# Altium footprint library FootPrintLib_8.PcbLib: 590 footprints (part 36 of 37)
Each footprint in its own frame and in the unit in brackets; x right, y up, seen from the top. Pads: shape width x height; smd on the part's side, far side on the other; paste and mask are expansions set on the pad; w line width, h text height; cw(c..) or ccw(c..) is an arc to the next point about the centre after c.
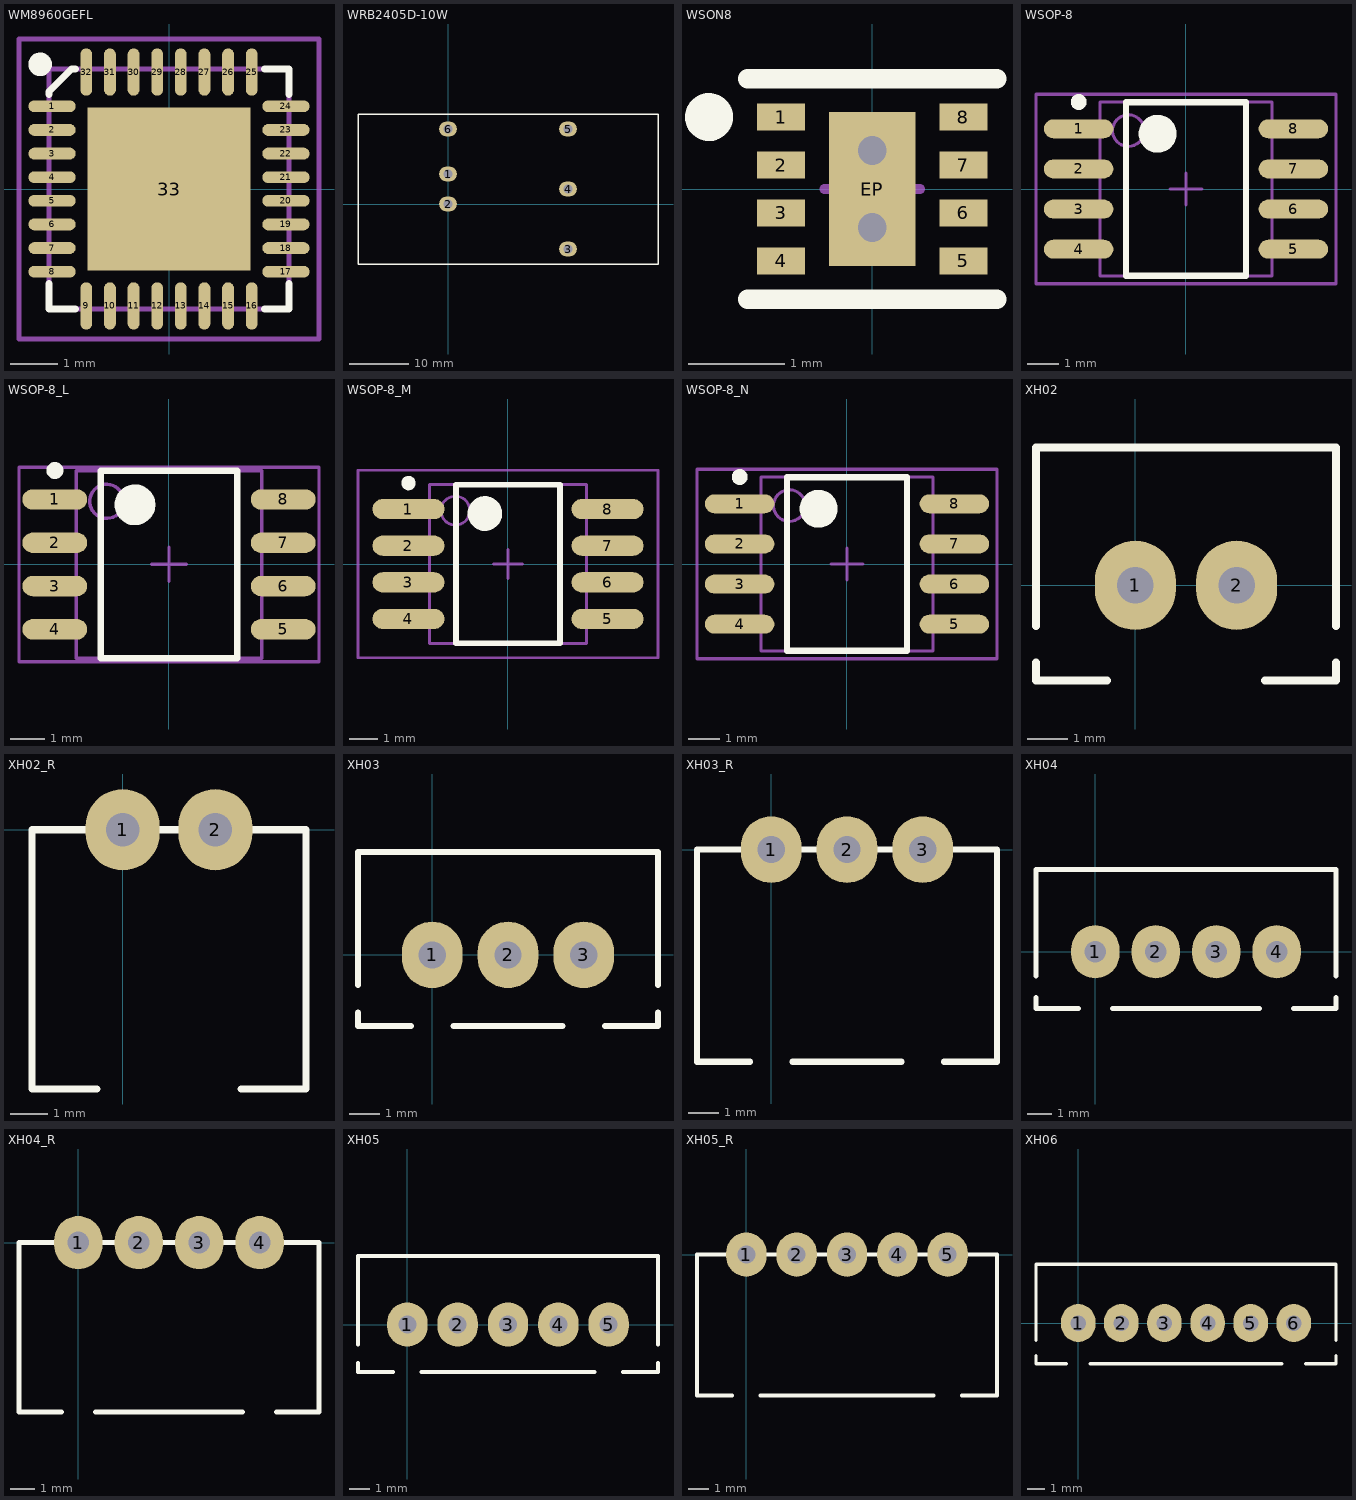
[diagram p35: the footprints below, top view; thin cyan lines are the x and y axes]

## WM8960GEFL [mm] "WM8960GEFL 32 PIN QFN PLASTIC PACKAGE 5 X 5 X 0.9 mm BODY, 0.50 mm LEAD PITCH"
height 0.9
pads (33):
  oval 1x0.25 smd: 1(-2.475,1.75) 2(-2.475,1.25) 3(-2.475,0.75) 4(-2.475,0.25) 5(-2.475,-0.25) 6(-2.475,-0.75) 7(-2.475,-1.25) 8(-2.475,-1.75) 17(2.475,-1.75) 18(2.475,-1.25) 19(2.475,-0.75) 20(2.475,-0.25) 21(2.475,0.25) 22(2.475,0.75) 23(2.475,1.25) 24(2.475,1.75)
  oval 0.25x1 smd: 9(-1.75,-2.475) 10(-1.25,-2.475) 11(-0.75,-2.475) 12(-0.25,-2.475) 13(0.25,-2.475) 14(0.75,-2.475) 15(1.25,-2.475) 16(1.75,-2.475) 25(1.75,2.475) 26(1.25,2.475) 27(0.75,2.475) 28(0.25,2.475) 29(-0.25,2.475) 30(-0.75,2.475) 31(-1.25,2.475) 32(-1.75,2.475)
  rect 3.45x3.45 smd paste-1.73: 33(0,0)
Top Overlay:
  circle w0.25: c-2.727,2.639 r0.125
  lines w0.15: -2.54,-2 -2.54,-2.54 -1.975,-2.54 ; -2.54,2 -2.54,2.066 -2.066,2.54 -1.975,2.54 ; 2.025,-2.54 2.54,-2.54 2.54,-2 ; 2.025,2.54 2.54,2.54 2.54,2
Top Paste:
  drawing of 25 lines, arcs and shapes, not listed
Mechanical 13:
  lines w0.1: -2.54,-2.54 2.54,-2.54 2.54,2.54 -2.54,2.54 -2.54,-2.54
Mechanical 15:
  lines w0.1: -0.5,0 0.5,0 ; 0,-0.5 0,0.5 ; -3.175,-3.175 -3.175,3.175 3.175,3.175 3.175,-3.175 -3.175,-3.175
3D body "User Library-QFN-32-5x5mm-WithPad.step": height 0.8, standoff 0, extent -2.515,-2.515 2.505,2.505

## WRB2405D-10W [mm] "Mornsun DC/DC Converter"
pads (6):
  oval 3x2.5 hole 1.5: 1(0,5.08) 2(0,0) 3(20.32,-7.62) 4(20.32,2.54) 5(20.32,12.7) 6(0,12.7)
Top Overlay:
  lines w0.254: -15.24,-10.16 -15.24,15.24 35.56,15.24 35.56,-10.16 -15.24,-10.16

## WSON8 [mm]
pads (9):
  rect 0.5x0.28 smd: 1(-0.95,0.75) 2(-0.95,0.25) 3(-0.95,-0.25) 4(-0.95,-0.75) 5(0.95,-0.75) 6(0.95,-0.25) 7(0.95,0.25) 8(0.95,0.75)
  rect 0.9x1.6 smd: EP(0,0)
via 0,0.4 diameter 0.5 hole 0.3
via 0,-0.4 diameter 0.5 hole 0.3
Top Overlay:
  circle w0.25: c-1.702,0.75 r0.125
  lines w0.2: -1.3,-1.15 1.3,-1.15 ; -1.3,1.15 1.3,1.15
Mechanical 15:
  lines w0.1: -0.5,0 0.5,0 ; 0,-0.5 0,0.5
3D body: height 0.65, standoff 0, extent -0.8,-0.8 0.8,0.8

## WSOP-8 [mm] "8-Pin Small Outline Package 1.27 mm Pitch, IPC Medium Density"
height 2.03
pads (8):
  oval 2.2x0.6 smd: 1(-3.4,1.905) 2(-3.4,0.635) 3(-3.4,-0.635) 4(-3.4,-1.905) 5(3.4,-1.905) 6(3.4,-0.635) 7(3.4,0.635) 8(3.4,1.905)
Top Overlay:
  circle w0.25: c-3.4,2.755 r0.125
  circle w0.6: c-0.9,1.75 r0.3
  lines w0.2: -1.9,-2.75 -1.9,2.75 1.9,2.75 1.9,-2.75 -1.9,-2.75
Mechanical 13:
  circle w0.1: c-1.825,1.85 r0.5
  lines w0.1: -2.725,-2.75 -2.725,2.75 2.725,2.75 2.725,-2.75 -2.725,-2.75
Mechanical 15:
  lines w0.1: -0.5,0 0.5,0 ; 0,-0.5 0,0.5 ; -4.75,-3 -4.75,3 4.75,3 4.75,-3 -4.75,-3
3D body "User Library-SO8-Wide-5mmx5mm.step": height 1.75, standoff -0.01, extent -4.051,-2.73 4.05,2.73

## WSOP-8_L [mm] "8-Pin Small Outline Package 1.27 mm Pitch, IPC High Density"
height 2.03
pads (8):
  oval 1.9x0.6 smd: 1(-3.35,1.905) 2(-3.35,0.635) 3(-3.35,-0.635) 4(-3.35,-1.905) 5(3.35,-1.905) 6(3.35,-0.635) 7(3.35,0.635) 8(3.35,1.905)
Top Overlay:
  circle w0.6: c-1,1.75 r0.3
  circle w0.25: c-3.35,2.755 r0.125
  lines w0.2: -2,-2.75 2,-2.75 2,2.75 -2,2.75 -2,-2.75
Mechanical 13:
  circle w0.1: c-1.825,1.85 r0.5
  lines w0.1: -2.725,-2.75 2.725,-2.75 2.725,2.75 -2.725,2.75 -2.725,-2.75
Mechanical 15:
  lines w0.1: -0.5,0 0.5,0 ; 0,-0.5 0,0.5 ; -4.4,-2.85 4.4,-2.85 4.4,2.85 -4.4,2.85 -4.4,-2.85
3D body "User Library-SO8-Wide-5mmx5mm.step": height 1.75, standoff -0.01, extent -4.051,-2.73 4.05,2.73

## WSOP-8_M [mm] "8-Pin Small Outline Package 1.27 mm Pitch, IPC Low Density"
height 2.03
pads (8):
  oval 2.5x0.7 smd: 1(-3.45,1.905) 2(-3.45,0.635) 3(-3.45,-0.635) 4(-3.45,-1.905) 5(3.45,-1.905) 6(3.45,-0.635) 7(3.45,0.635) 8(3.45,1.905)
Top Overlay:
  circle w0.25: c-3.45,2.805 r0.125
  circle w0.6: c-0.8,1.75 r0.3
  lines w0.2: -1.8,-2.75 -1.8,2.75 1.8,2.75 1.8,-2.75 -1.8,-2.75
Mechanical 13:
  circle w0.1: c-1.825,1.85 r0.5
  lines w0.1: -2.725,-2.75 -2.725,2.75 2.725,2.75 2.725,-2.75 -2.725,-2.75
Mechanical 15:
  lines w0.1: -0.5,0 0.5,0 ; 0,-0.5 0,0.5 ; -5.2,-3.25 -5.2,3.25 5.2,3.25 5.2,-3.25 -5.2,-3.25
3D body "User Library-SO8-Wide-5mmx5mm.step": height 1.75, standoff -0.01, extent -4.051,-2.73 4.05,2.73

## WSOP-8_N [mm] "8-Pin Small Outline Package 1.27 mm Pitch, IPC Medium Density"
height 2.03
pads (8):
  oval 2.2x0.6 smd: 1(-3.4,1.905) 2(-3.4,0.635) 3(-3.4,-0.635) 4(-3.4,-1.905) 5(3.4,-1.905) 6(3.4,-0.635) 7(3.4,0.635) 8(3.4,1.905)
Top Overlay:
  circle w0.6: c-0.9,1.75 r0.3
  circle w0.25: c-3.4,2.755 r0.125
  lines w0.2: -1.9,-2.75 1.9,-2.75 1.9,2.75 -1.9,2.75 -1.9,-2.75
Mechanical 13:
  circle w0.1: c-1.825,1.85 r0.5
  lines w0.1: -2.725,-2.75 2.725,-2.75 2.725,2.75 -2.725,2.75 -2.725,-2.75
Mechanical 15:
  lines w0.1: -0.5,0 0.5,0 ; 0,-0.5 0,0.5 ; -4.75,-3 4.75,-3 4.75,3 -4.75,3 -4.75,-3
3D body "User Library-SO8-Wide-5mmx5mm.step": height 1.75, standoff -0.01, extent -4.051,-2.73 4.05,2.73

## XH02 [mm] "XH Connector, Body 2.5 x 7.4 mm"
height 7
pads (2):
  oval 2x2.2 hole 0.9: 1(0,0) 2(2.5,0)
Top Overlay:
  lines w0.2: -2.45,-1.9 -2.45,-2.35 -0.7,-2.35 ; -2.45,-1 -2.45,3.4 4.95,3.4 4.95,-1 ; 3.2,-2.35 4.925,-2.35 ; 4.95,-2.35 4.95,-1.9
3D body "User Library-PW10-XX-M redPW10-2M.STEP": height 7, standoff -3.3, extent -2.5,-2.3 5,3.4

## XH02_R [mm] "XH Connector, Body 2.5 x 7.4 mm"
height 5.75
pads (2):
  oval 2x2.2 hole 0.9: 1(0,0) 2(2.5,0)
Top Overlay:
  lines w0.2: -0.7,-7 -2.45,-7 -2.45,0 4.95,0 4.95,-7 ; 3.2,-7 4.925,-7
3D body "XH02_R.step": height 5.75, standoff -2, extent -2.45,-7 4.95,0.3
3D body: height 7, standoff -3.3, extent -1.125,1.225 -1.125,1.225
3D body: height 5.25, standoff 0.5, extent -2.45,0 -2.45,0
3D body: height 5.25, standoff 0.5, extent 4.95,0 4.95,0
3D body: height 5.25, standoff 0.5, extent -2.45,0 -2.45,0

## XH03 [mm] "XH Connector, Body 5 x 9.9 mm"
height 7
pads (3):
  oval 2x2.2 hole 0.9: 1(0,0) 2(2.5,0) 3(5,0)
Top Overlay:
  lines w0.2: -2.45,-1.9 -2.45,-2.35 -0.7,-2.35 ; -2.45,-1 -2.45,3.4 7.45,3.4 7.45,-1 ; 0.7,-2.35 3.375,-2.35 ; 1.625,-2.35 4.3,-2.35 ; 5.7,-2.35 7.45,-2.35 7.45,-1.9
3D body "User Library-PW10-XX-M redPW10-3M.STEP": height 7, standoff -3.3, extent -2.5,-2.35 7.5,3.35

## XH03_R [mm] "XH Connector, Body 5 x 9.9 mm"
height 5.75
pads (3):
  oval 2x2.2 hole 0.9: 1(0,0) 2(2.5,0) 3(5,0)
Top Overlay:
  lines w0.2: -0.7,-7 -2.45,-7 -2.45,0 7.45,0 7.45,-7 ; 0.7,-7 4.3,-7 ; 5.7,-7 7.425,-7
3D body "XH03_R.step": height 5.75, standoff -2, extent -2.45,-7 7.45,0.3
3D body: height 5.25, standoff 0.5, extent 7.45,0 7.45,0
3D body: height 5.25, standoff 0.5, extent 7.45,0 7.45,0
3D body: height 5.25, standoff 0.5, extent -2.45,0 -2.45,0
3D body: height 5.25, standoff 0.5, extent -2.45,0 -2.45,0
3D body: height 5.25, standoff 0.5, extent 7.45,0 7.45,0
3D body: height 7, standoff -3.3, extent -1.125,1.225 -1.125,1.225
3D body: height 5.25, standoff 0.5, extent -2.45,0 -2.45,0
3D body: height 5.25, standoff 0.5, extent -2.45,0 -2.45,0

## XH04 [mm] "XH Connector, Body 7.5 x 12.4 mm"
height 7
pads (4):
  oval 2x2.2 hole 0.9: 1(0,0) 2(2.5,0) 3(5,0) 4(7.5,0)
Top Overlay:
  lines w0.2: -2.45,-1.9 -2.45,-2.35 -0.7,-2.35 ; -2.45,-1 -2.45,3.4 9.95,3.4 9.95,-1 ; 0.7,-2.35 3.375,-2.35 ; 2.95,-2.35 6.8,-2.35 ; 8.2,-2.35 9.95,-2.35 9.95,-1.9
3D body "User Library-PW10-XX-M redPW10-4M.STEP": height 7, standoff -3.3, extent -2.5,-2.35 10,3.35

## XH04_R [mm] "XH Connector, Body 7.5 x 12.4 mm"
height 5.75
pads (4):
  oval 2x2.2 hole 0.9: 1(0,0) 2(2.5,0) 3(5,0) 4(7.5,0)
Top Overlay:
  lines w0.2: -0.7,-7 -2.45,-7 -2.45,0 9.95,0 9.95,-7 ; 0.7,-7 4.3,-7 ; 3.2,-7 6.8,-7 ; 8.2,-7 9.925,-7
3D body: height 5.25, standoff 0.5, extent -2.45,0 -2.45,0
3D body: height 5.25, standoff 0.5, extent -2.45,0 -2.45,0
3D body: height 7, standoff -3.3, extent -1.125,1.225 -1.125,1.225
3D body: height 5.25, standoff 0.5, extent -2.45,0 -2.45,0
3D body: height 5.25, standoff 0.5, extent -2.45,0 -2.45,0
3D body: height 5.25, standoff 0.5, extent 9.95,0 9.95,0
3D body: height 5.25, standoff 0.5, extent 9.95,0 9.95,0
3D body: height 5.25, standoff 0.5, extent 9.95,0 9.95,0
3D body: height 2, standoff -2, extent -0.3,0.3 0.3,0.3
3D body: height 2, standoff -2, extent 2.2,0.3 2.8,0.3
3D body: height 2, standoff -2, extent 4.7,0.3 5.3,0.3
3D body: height 2, standoff -2, extent 7.2,0.3 7.8,0.3
3D body: height 5.25, standoff 0.5, extent -2.45,0 -2.45,0
3D body: height 5.25, standoff 0.5, extent -2.45,0 -2.45,0
3D body: height 5.25, standoff 0.5, extent 9.95,0 9.95,0
3D body: height 5.25, standoff 0.5, extent 9.95,0 9.95,0
3D body: height 5.25, standoff 0.5, extent -2.45,0 -2.45,0
3D body: height 5.25, standoff 0.5, extent -2.45,0 -2.45,0
3D body: height 5.25, standoff 0.5, extent 9.95,0 9.95,0
3D body: height 5.25, standoff 0.5, extent 9.95,0 9.95,0
3D body "XH04_R.step": height 5.75, standoff -2, extent -2.45,-7 9.95,0.3

## XH05 [mm] "XH Connector, Body 10 x 14.9 mm"
height 7
pads (5):
  oval 2x2.2 hole 0.9: 1(0,0) 2(2.5,0) 3(5,0) 4(7.5,0) 5(10,0)
Top Overlay:
  lines w0.2: -2.45,-1.9 -2.45,-2.35 -0.7,-2.35 ; -2.45,-1 -2.45,3.4 12.45,3.4 12.45,-1 ; 0.7,-2.35 3.375,-2.35 ; 1.625,-2.35 5.875,-2.35 ; 5.9,-2.35 9.3,-2.35 ; 10.7,-2.35 12.45,-2.35 12.45,-1.9
3D body "User Library-PW10-XX-M redPW10-5M.STEP": height 7, standoff -3.3, extent -2.5,-2.35 12.5,3.35

## XH05_R [mm] "XH Connector, Body 10 x 14.9 mm"
height 5.75
pads (5):
  oval 2x2.2 hole 0.9: 1(0,0) 2(2.5,0) 3(5,0) 4(7.5,0) 5(10,0)
Top Overlay:
  lines w0.2: -0.7,-7 -2.45,-7 -2.45,0 12.45,0 12.45,-7 ; 0.7,-7 4.3,-7 ; 4.025,-7 9.3,-7 ; 10.7,-7 12.425,-7
3D body: height 5.25, standoff 0.5, extent 12.45,0 12.45,0
3D body: height 5.25, standoff 0.5, extent 12.45,0 12.45,0
3D body: height 5.25, standoff 0.5, extent 12.45,0 12.45,0
3D body: height 5.25, standoff 0.5, extent -2.45,0 -2.45,0
3D body: height 5.25, standoff 0.5, extent -2.45,0 -2.45,0
3D body: height 7, standoff -3.3, extent -1.125,1.225 -1.125,1.225
3D body: height 5.25, standoff 0.5, extent -2.45,0 -2.45,0
3D body: height 5.25, standoff 0.5, extent -2.45,0 -2.45,0
3D body: height 2, standoff -2, extent -0.3,0.3 0.3,0.3
3D body: height 2, standoff -2, extent 2.2,0.3 2.8,0.3
3D body: height 2, standoff -2, extent 4.7,0.3 5.3,0.3
3D body: height 2, standoff -2, extent 7.2,0.3 7.8,0.3
3D body: height 2, standoff -2, extent 9.7,0.3 10.3,0.3
3D body: height 5.25, standoff 0.5, extent 12.45,0 12.45,0
3D body: height 5.25, standoff 0.5, extent 12.45,0 12.45,0
3D body: height 5.25, standoff 0.5, extent -2.45,0 -2.45,0
3D body: height 5.25, standoff 0.5, extent -2.45,0 -2.45,0
3D body: height 5.25, standoff 0.5, extent 12.45,0 12.45,0
3D body: height 5.25, standoff 0.5, extent 12.45,0 12.45,0
3D body: height 5.25, standoff 0.5, extent -2.45,0 -2.45,0
3D body: height 5.25, standoff 0.5, extent -2.45,0 -2.45,0
3D body "XH05_R.step": height 5.75, standoff -2, extent -2.45,-7 12.45,0.3

## XH06 [mm] "XH Connector, Body 12.5 x 17.4 mm"
height 7
pads (6):
  oval 2x2.2 hole 0.9: 1(0,0) 2(2.5,0) 3(5,0) 4(7.5,0) 5(10,0) 6(12.5,0)
Top Overlay:
  lines w0.2: -2.45,-1.9 -2.45,-2.35 -0.7,-2.35 ; -2.45,-1 -2.45,3.4 14.95,3.4 14.95,-1 ; 0.7,-2.35 3.375,-2.35 ; 3.3,-2.35 11.8,-2.35 ; 13.2,-2.35 14.95,-2.35 14.95,-1.9
3D body "User Library-PW10-XX-M redPW10-6M.STEP": height 7, standoff -3.3, extent -2.5,-2.35 15,3.35